# Altium footprint library aksima_footprint.PcbLib: 64 footprints (part 1 of 4)
Each footprint in its own frame and in the unit in brackets; x right, y up, seen from the top. Pads: shape width x height; smd on the part's side, far side on the other; paste and mask are expansions set on the pad; w line width, h text height; cw(c..) or ccw(c..) is an arc to the next point about the centre after c.
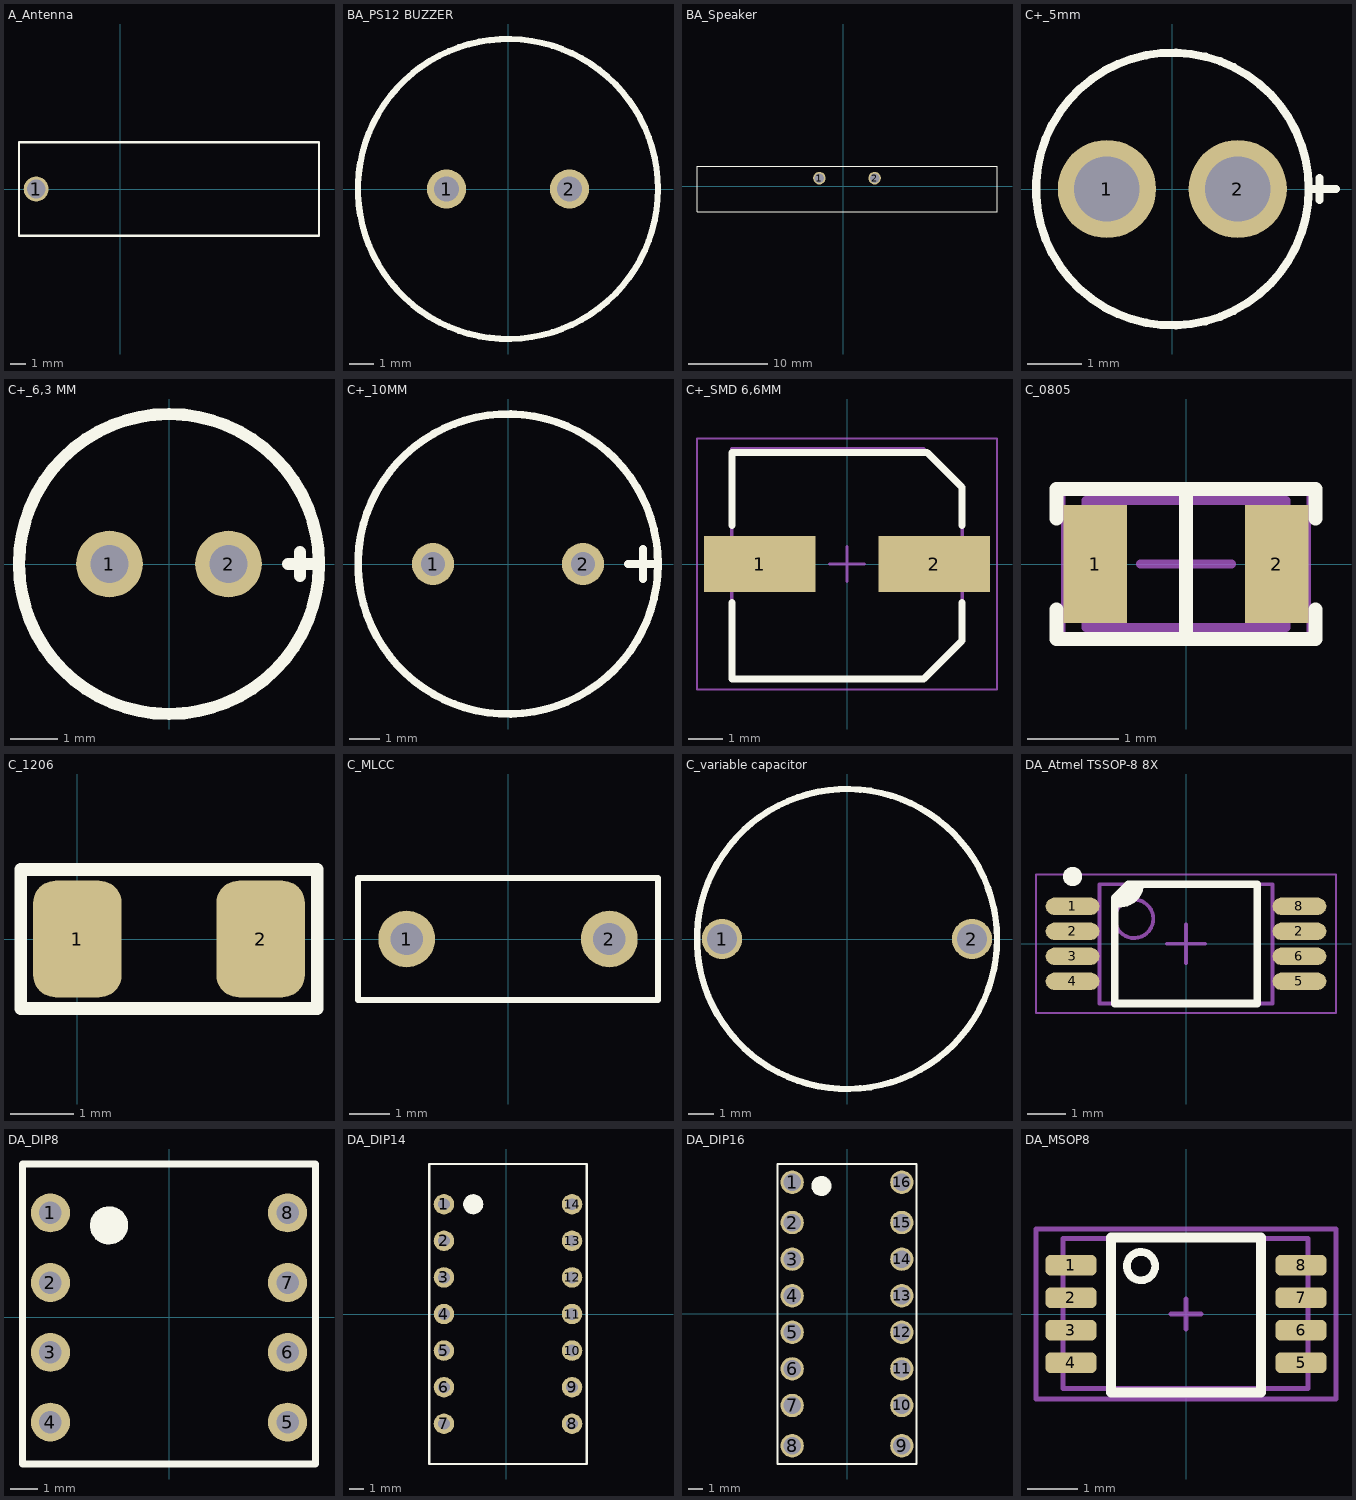
[diagram p0: the footprints below, top view; thin cyan lines are the x and y axes]

## A_Antenna [mm] "Antenna footprint, Antenna"
pads (1):
  round 1.6 hole 1.2: 1(-5.4,0)
Top Overlay:
  lines w0.15: -6.5,-3 12.75,-3 12.75,3 -6.5,3 -6.5,0 -6.5,-3
3D body "SW868-TH13.STEP": height 5.25, standoff -0.4, extent -5.8,-2.748 12.497,2.75

## BA_PS12 BUZZER [mm] "Piezoelectric sounder, PS12 series"
pads (2):
  round 1.6 hole 1: 1(-2.5,0) 2(2.5,0)
Top Overlay:
  circle w0.254: c0,0 r6.1
3D body "Buzzer_TDK_pitch_5.stp": height 9, standoff -2, extent -6.1,-6.097 6.1,6.1

## BA_Speaker [mm] "Acoustic transducer footprint, Speaker"
pads (2):
  round 1.6 hole 1.2: 1(-3,1) 2(4,1)
Top Overlay:
  lines w0.15: -18.5,-3.25 -18.5,2.5 19.5,2.5 19.5,-3.25 -18.5,-3.25
3D body "CLS0281MAE-L152.step": height 33.76, standoff -2.56, extent -18.388,-2.95 19.388,2.25

## C+_5mm [mm] "Radial polarized capacitor, 5 mm body"
pads (2):
  round 1.8 hole 1.2: 1(-1.2,0) 2(1.2,0)
Top Overlay:
  circle w0.15: c0,0 r2.5
  lines w0.15: 2.5,0 3,0 ; 2.7,-0.2 2.7,0.2
3D body "ElCapVT-2.0-5x7.step": height 7, standoff -3, extent -2.501,-2.499 2.5,2.499

## C+_6,3 MM [mm] "Radial polarized capacitor, 6.3 mm body"
pads (2):
  round 1.4 hole 0.8: 1(-1.25,0) 2(1.25,0)
Top Overlay:
  circle w0.254: c0,0 r3.15
  lines w0.254: 2.5,0 3.15,0 ; 2.75,-0.25 2.75,0.25
3D body "100uF 16V electr 6.3 x11mm -P.diameter 3.2mm-Black-White.stp": height 11, standoff -4.1, extent -3.15,-3.141 3.15,3.141

## C+_10MM [mm] "Radial polarized capacitor, 10 mm body"
pads (2):
  round 1.4 hole 0.8: 1(-2.5,0) 2(2.5,0)
Top Overlay:
  circle w0.254: c0,0 r5
  lines w0.254: 4,0 5,0 ; 4.5,-0.5 4.5,0.5
3D body "1000uF 16V electr 10 x16mm  -P.diameter 5mm-Black-White.stp": height 16, standoff -4.1, extent -5,-4.996 5,4.996

## C+_SMD 6,6MM [mm] "Aluminum Electrolytic Capacitor, Body 6.60x6.60x5.40mm, IPC Low Density"
height 5.4
pads (2):
  rect 3.2x1.6 smd: 1(-2.5,0) 2(2.5,0)
Top Overlay:
  lines w0.2: -3.3,-1.1 -3.3,-3.3 2.2,-3.3 3.3,-2.2 3.3,-1.1 ; -3.3,1.1 -3.3,1.625 -3.3,2.675 -3.3,3.2 2.3,3.2 3.3,2.2 3.3,1.1
Mechanical 13:
  lines w0.1: -3.3,-3.3 2.2,-3.3 3.3,-2.2 3.3,2.2 2.2,3.3 -3.3,3.3 -3.3,-3.3
Mechanical 15:
  lines w0.05: -4.3,-3.6 -4.3,3.6 4.3,3.6 4.3,-3.6 -4.3,-3.6
  lines w0.1: -0.5,0 0.5,0 ; 0,-0.5 0,0.5
3D body "CAP ALSMD - 6.6 x 6.6 x 5.4.step": height 5.4, standoff 0, extent -3.5,-3.3 3.5,3.3

## C_0805 [mm] "Chip Capacitor, 2-Leads, Body 2.00x1.20mm, IPC High Density"
height 1.15
pads (2):
  rect 0.7x1.3 smd: 1(-1,0) 2(1,0)
Top Overlay:
  lines w0.15: -1.425,-0.5 -1.425,-0.825 1.425,-0.825 1.425,-0.5 ; -1.425,0.5 -1.425,0.825 1.425,0.825 1.425,0.5 ; -0.025,0.825 0,0.825 0,-0.825
Mechanical 13:
  lines w0.1: -1.1,-0.7 1.1,-0.7 1.1,0.7 -1.1,0.7 -1.1,-0.7
Mechanical 15:
  lines w0.05: -1.35,-0.8 1.35,-0.8 1.35,0.8 -1.35,0.8 -1.35,-0.8
  lines w0.1: -0.5,0 0.5,0 ; 0,-0.5 0,0.5
3D body "0805 cap.STEP": height 1.26, standoff -0.02, extent -1,-0.637 1,0.637

## C_1206 [mm] "Capacitor footprint, 1206"
pads (2):
  rrect50% 1.4x1.85 smd: 1(0,0) 2(2.9,0)
Top Overlay:
  lines w0.2: -0.9,-1.1 3.8,-1.1 3.8,1.1 -0.9,1.1 -0.9,-1.1
3D body "CAPC1206.step": height 1, standoff 0, extent -0.1,-0.8 3.1,0.8

## C_MLCC [mm] "Through-hole multilayer ceramic capacitor"
pads (2):
  round 1.4 hole 0.8: 1(-2.5,0) 2(2.5,0)
Top Overlay:
  lines w0.15: -3.7,-1.5 3.7,-1.5 3.7,1.5 -3.7,1.5 -3.7,-1.5
3D body "330pF MLCC Ceramic Capacitor.SLDPRT": height 7.5, standoff -7, extent -2.788,-1.251 2.788,1.251

## C_variable capacitor [mm] "Capacitor footprint, variable capacitor"
pads (2):
  round 1.6 hole 1.2: 1(-5,0) 2(5,0)
Top Overlay:
  circle w0.254: c0,0 r6
3D body "Trimmer variable capacitor.step": height 9, standoff -2.5, extent -5.28,-5.28 5.28,5

## DA_Atmel TSSOP-8 8X [mm] "TSSOP, 8-Leads, Body 3.00x4.40mm, Pitch 0.65mm, IPC Medium Density"
height 1.2
pads (8):
  oval 1.4x0.45 smd: 1(-2.95,0.975) 2(-2.95,0.325) 2(2.95,0.325) 3(-2.95,-0.325) 4(-2.95,-0.975) 5(2.95,-0.975) 6(2.95,-0.325) 8(2.95,0.975)
Top Overlay:
  circle w0.25: c-2.95,1.75 r0.125
  region: -1.5,1.55 -1.2,1.55 -1.2,1.451 -1.276,1.267 -1.417,1.126 -1.601,1.05 -1.7,1.05 -1.8,1.05 -1.8,1.25
  lines w0.2: -1.8,1.05 -1.7,1.05 ccw(c-1.7,1.55) -1.2,1.55 ; -1.85,-1.55 1.85,-1.55 1.85,1.55 -1.5,1.55 -1.85,1.2 -1.85,-1.55
Mechanical 13:
  circle w0.1: c-1.35,0.65 r0.5
  lines w0.1: -2.25,-1.55 -2.25,1.55 2.25,1.55 2.25,-1.55 -2.25,-1.55
Mechanical 15:
  lines w0.05: -3.9,-1.8 -3.9,1.8 3.9,1.8 3.9,-1.8 -3.9,-1.8
  lines w0.1: -0.5,0 0.5,0 ; 0,-0.5 0,0.5
3D body "TSSOP-8.STEP": height 1.2, standoff 0, extent -3.21,-1.5 3.211,1.5

## DA_DIP8 [mm] "8-pin dual in-line IC"
pads (8):
  round 1.4 hole 0.8 unplated: 1(-4.25,3.75) 2(-4.25,1.25) 3(-4.25,-1.25) 4(-4.25,-3.75) 5(4.25,-3.75) 6(4.25,-1.25) 7(4.25,1.25) 8(4.25,3.75)
Top Overlay:
  circle w0.254: c-2.15,3.3 r0.559
  rectangle: -2.65,2.8 -1.65,3.8
  lines w0.254: -5.25,-5.25 5.25,-5.25 5.25,5.5 -5.25,5.5 -5.25,-5.25
3D body "DIP-8 N.step": height 4.6, standoff -2.75, extent -4.568,-4.9 4.568,4.9

## DA_DIP14 [mm] "14-pin dual in-line IC"
pads (14):
  round 1.4 hole 0.8 unplated: 1(-4.25,7.5) 2(-4.25,5) 3(-4.25,2.5) 4(-4.25,0) 5(-4.25,-2.5) 6(-4.25,-5) 7(-4.25,-7.5) 8(4.5,-7.5) 9(4.5,-5) 10(4.5,-2.5) 11(4.5,0) 12(4.5,2.5) 13(4.5,5) 14(4.5,7.5)
Top Overlay:
  circle w0.254: c-2.25,7.5 r0.559
  rectangle: -2.5,7.25 -2,7.75
  rectangle: -2.75,7 -1.75,8
  lines w0.15: -5.25,-10.25 -5.25,7.5 -5.25,10.25 5.5,10.25 5.5,-10.25 -5.25,-10.25
3D body "DIP14.STEP": height 3.51, standoff -2.69, extent -4.66,-9.97 5,9.97

## DA_DIP16 [mm] "16-pin dual in-line IC"
pads (16):
  round 1.6 hole 1.2 unplated: 1(-3.75,9) 2(-3.75,6.25) 3(-3.75,3.75) 4(-3.75,1.25) 5(-3.75,-1.25) 6(-3.75,-3.75) 7(-3.75,-6.25) 8(-3.75,-9) 9(3.75,-9) 10(3.75,-6.25) 11(3.75,-3.75) 12(3.75,-1.25) 13(3.75,1.25) 14(3.75,3.75) 15(3.75,6.25) 16(3.75,9)
Top Overlay:
  circle w0.254: c-1.75,8.75 r0.559
  rectangle: -2.25,8.25 -1.25,9.25
  lines w0.15: -4.75,-10.25 -4.75,10.25 4.75,10.25 4.75,-10.25 -4.75,-10.25
3D body "DIP16.STEP": height 4.7, standoff -2.6, extent -3.935,-9.98 3.935,9.98

## DA_MSOP8 [mm] "Integrated circuit footprint, MSOP8"
pads (8):
  rrect50% 1.02x0.41 smd: 1(-2.3,0.975) 2(-2.3,0.325) 3(-2.3,-0.325) 4(-2.3,-0.975) 5(2.3,-0.975) 6(2.3,-0.325) 7(2.3,0.325) 8(2.3,0.975)
Top Overlay:
  circle w0.154: c-0.9,0.958 r0.283
  lines w0.2: -1.5,-1.565 1.5,-1.565 1.5,1.535 -1.5,1.535 -1.5,-1.565
Mechanical 1:
  text ".Designator" at -1.1,-0.5 h1
Mechanical 13:
  lines w0.102: -2.464,-1.49 2.436,-1.49 2.436,1.51 -2.464,1.51 -2.464,-1.49
Mechanical 15:
  lines w0.102: -0.3,0 0.3,0 ; 0,-0.3 0,0.3 ; -3,-1.7 3,-1.7 3,1.7 -3,1.7 -3,-1.7
3D body "MSOP-8.step": height 1.15, standoff 0, extent -2.464,-1.49 2.436,1.51